# Altium integrated library 74HC4051BQ_115.IntLib: 1 symbol
Pins are listed as number, name and electrical type; pins without a type are passive.

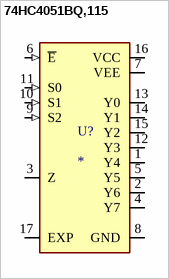
[diagram p0: symbol 74HC4051BQ,115]

## 74HC4051BQ,115
designator U?
1 Circuit IC Switch 8:1 120Ohm 16-DHVQFN (2.5x3.5); MF: Nexperia USA Inc.; MP: 74HC4051BQ,115; DigiKey_Part_Number: 1727-6049-2-ND; Purchase-URL: https://pricing.snapeda.com/search?q=74HC4051BQ,115&ref=eda; Package: DHVQFN16-16 Nexperia USA Inc.; Check_prices: https://www.snapeda.com/parts/74HC4051BQ,115/Nexperia/view-part/?ref=eda; Value: *; SnapEDA_Link: https://www.snapeda.com/parts/74HC4051BQ,115/Nexperia/view-part/?ref=snap
footprint QFN50P250X350X100-17N
pins: 1 Y4 (io), 2 Y6 (io), 3 Z (io), 4 Y7 (io), 5 Y5 (io), 6 ~{E} (in), 7 VEE (power), 8 GND (power), 9 S2 (in), 10 S1 (in), 11 S0 (in), 12 Y3 (io), 13 Y0 (io), 14 Y1 (io), 15 Y2 (io), 16 VCC (power), 17 EXP (power)